# Altium footprint library PBL - THD Packages.PcbLib: 160 footprints (part 1 of 10)
Each footprint in its own frame and in the unit in brackets; x right, y up, seen from the top. Pads: shape width x height; smd on the part's side, far side on the other; paste and mask are expansions set on the pad; w line width, h text height; cw(c..) or ccw(c..) is an arc to the next point about the centre after c.
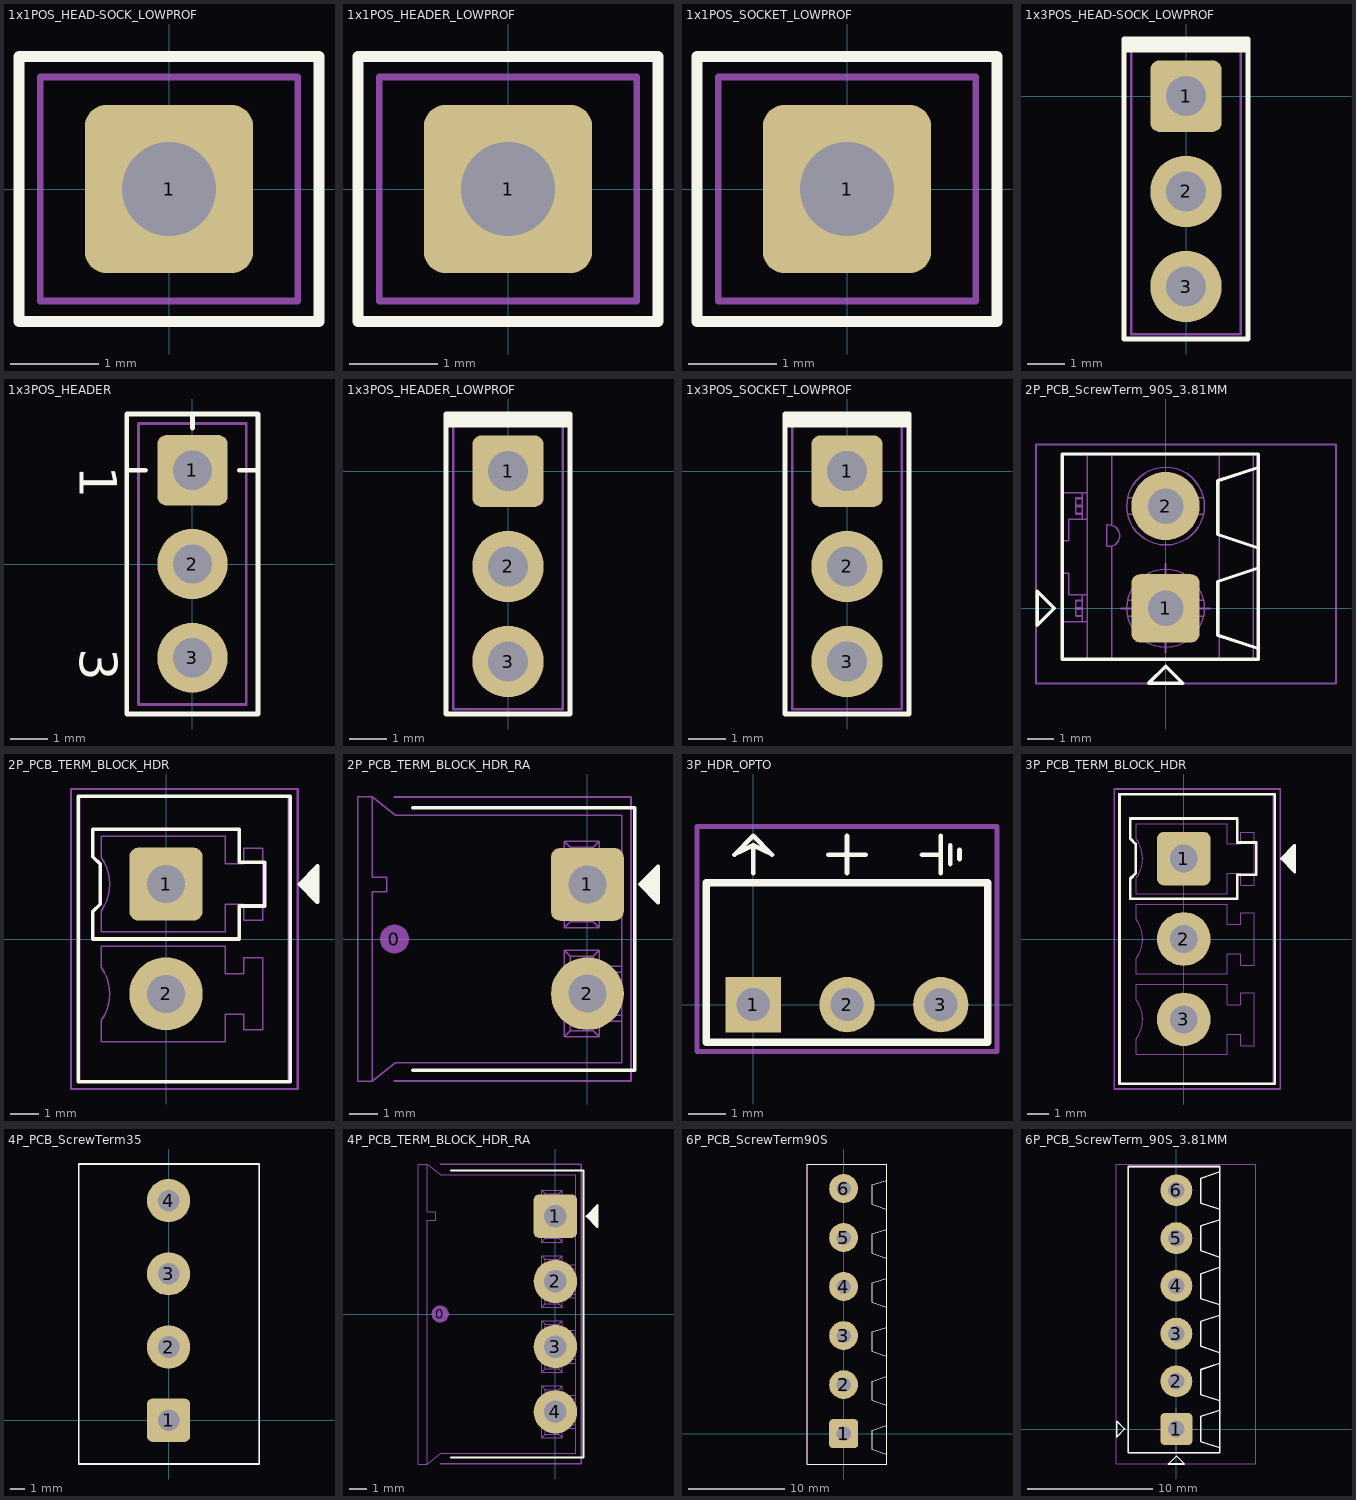
[diagram p0: the footprints below, top view; thin cyan lines are the x and y axes]

## 1x1POS_HEAD-SOCK_LOWPROF [mil] "Connector Socket with header, Single-row 1-position, 0.100\" pitch"
height 290
pads (1):
  rrect25% 75x75 hole 42: 1(0,0)
Top Overlay:
  lines w5: -66.93,-59.05 66.93,-59.05 66.93,59.06 -66.93,59.06 -66.93,-59.05
13 - 3D Top Side:
  lines w3: -57.47,-49.99 57.49,-49.99 57.49,50.01 -57.47,50.01 -57.47,-49.99
3D body: height 165, standoff -125, extent -57.47,-50 57.49,50
3D body: height 408, standoff 23, extent -57.47,-50 57.49,50

## 1x1POS_HEADER_LOWPROF [mil] "Connector Header, Single-row 1-position, 0.100\" pitch"
height 267
pads (1):
  rrect25% 75x75 hole 42: 1(0,0)
Top Overlay:
  lines w5: -66.93,-59.06 -66.93,59.06 66.93,59.06 66.93,-59.06 -66.93,-59.06
13 - 3D Top Side:
  lines w3: -57.47,-50 -57.47,50 57.49,50 57.49,-50 -57.47,-50
3D body: height 267, standoff -118, extent -57.47,-50 57.49,50

## 1x1POS_SOCKET_LOWPROF [mil] "Connector Socket, Single-row 1-position, 0.100\" pitch"
height 165
pads (1):
  rrect25% 75x75 hole 42: 1(0,0)
Top Overlay:
  lines w5: -66.93,-59.06 -66.93,59.06 66.93,59.06 66.93,-59.06 -66.93,-59.06
13 - 3D Top Side:
  lines w3: -57.47,-50 -57.47,50 57.49,50 57.49,-50 -57.47,-50
3D body: height 165, standoff -125, extent -57.47,-50 57.49,50

## 1x3POS_HEAD-SOCK_LOWPROF [mil] "Connector Socket with header, Single-row 3-position, 0.100\" pitch"
height 290
pads (3):
  rrect25% 75x75 hole 42: 1(0,0)
  round 75 hole 42: 2(0,-100) 3(0,-200)
Top Overlay:
  lines w5: -65,48.19 65,48.19 ; -65,52.13 65,52.13 ; -65,56.06 65,56.06 ; -65,-255 -65,60 65,60 65,-255 -65,-255
13 - 3D Top Side:
  lines w3: -57.47,-250 -57.47,50 57.49,50 57.49,-250 -57.47,-250
3D body: height 165, standoff -125, extent -57.47,-50 57.49,50
3D body: height 165, standoff -125, extent -57.47,-150 57.49,-50
3D body: height 165, standoff -125, extent -57.47,-250 57.49,-150
3D body: height 408, standoff 23, extent -57.48,-50 57.49,50
3D body: height 408, standoff 23, extent -57.48,-150 57.49,-50
3D body: height 408, standoff 23, extent -57.48,-250 57.49,-150

## 1x3POS_HEADER [mil] "Connector Header, Single-row 3-position, 0.100\" pitch"
height 235
pads (3):
  rrect25% 75x75 hole 42: 1(0,100)
  round 75 hole 42: 2(0,0) 3(0,-100)
Top Overlay:
  lines w5: -70,100 -50,100 ; 0,145 0,160 ; 50,100 70,100 ; -70,-160 70,-160 70,160 -70,160 -70,-160
  text "1" at -120,105 h40
  text "3" at -120,-90 h40
13 - 3D Top Side:
  lines w3: -57.47,-150 57.49,-150 57.49,150 -57.47,150 -57.47,-150
3D body: height 335.04, standoff -144.88, extent -57.47,-150 57.49,150

## 1x3POS_HEADER_LOWPROF [mil] "Connector Header, Single-row 3-position, 0.100\" pitch"
height 267
pads (3):
  rrect25% 75x75 hole 42: 1(0,0)
  round 75 hole 42: 2(0,-100) 3(0,-200)
Top Overlay:
  lines w5: -65,48.19 65,48.19 ; -65,52.13 65,52.13 ; -65,56.06 65,56.06 ; -65,-255 -65,60 65,60 65,-255 -65,-255
13 - 3D Top Side:
  lines w3: -57.47,-250 -57.47,50 57.49,50 57.49,-250 -57.47,-250
3D body: height 267, standoff -118, extent -57.47,-50 57.49,50
3D body: height 267, standoff -118, extent -57.47,-150 57.49,-50
3D body: height 267, standoff -118, extent -57.47,-250 57.49,-150

## 1x3POS_SOCKET_LOWPROF [mil] "Connector Socket, Single-row 3-position, 0.100\" pitch"
height 165
pads (3):
  rrect25% 75x75 hole 42: 1(0,0)
  round 75 hole 42: 2(0,-100) 3(0,-200)
Top Overlay:
  lines w5: -65,48.19 65,48.19 ; -65,52.13 65,52.13 ; -65,56.06 65,56.06 ; -65,-255 -65,60 65,60 65,-255 -65,-255
13 - 3D Top Side:
  lines w3: -57.47,-250 -57.47,50 57.49,50 57.49,-250 -57.47,-250
3D body: height 165, standoff -125, extent -57.47,-50 57.49,50
3D body: height 165, standoff -125, extent -57.47,-150 57.49,-50
3D body: height 165, standoff -125, extent -57.47,-250 57.49,-150

## 2P_PCB_ScrewTerm_90S_3.81MM [mil] "TERM BLOCK 2POS SIDE ENT STACKABLE 3.81MM"
height 334.65
pads (2):
  rrect25% 100x100 hole 52: 1(0,0)
  round 100 hole 52: 2(0,150)
Top Overlay:
  lines w5: 135.83,-59.06 76.78,-39.37 76.78,39.37 135.83,59.06 ; 135.83,88.58 76.78,108.27 76.78,187.01 135.83,206.69 ; -188,-25 -163,0 -188,25 -188,-25 ; -151.57,-75 -151.57,226.38 135.83,226.38 135.83,-75 -151.57,-75 ; -25,-110 25,-110 0,-85 -25,-110
13 - 3D Top Side:
  circle w1.97: c0,0 r57.09
  circle w1.97: c0,150 r57.09
  lines w1.97: -151.57,-19.69 -114.76,-19.69 -114.76,19.68 -141.73,19.68 -141.73,51.18 -151.57,51.18 ; -151.57,98.82 -141.73,98.82 -141.73,130.31 -114.76,130.31 -114.76,169.69 -151.57,169.69 ; -131.89,-10.91 -122.05,-10.91 ; -131.89,-1.06 -122.05,-1.06 ; -131.89,1.06 -122.05,1.06 ; -131.89,10.91 -122.05,10.91 ; -131.89,139.09 -122.05,139.09 ; -131.89,148.94 -122.05,148.94 ; -131.89,151.06 -122.05,151.06 ; -131.89,160.91 -122.05,160.91 ; -122.05,-19.69 -122.05,19.68 ; -122.05,-11.81 -131.89,-11.81 -131.89,11.81 -122.05,11.81 ; -122.05,130.31 -122.05,169.69 ; -122.05,138.19 -131.89,138.19 -131.89,161.81 -122.05,161.81 ; -114.56,-75 -114.56,225 ; -78.74,-75 -78.74,91.34 ; -78.74,121.65 -78.74,225 ; -55.85,-11.81 55.85,-11.81 ; -55.85,11.81 55.85,11.81 ; -55.85,138.19 55.85,138.19 ; -55.85,161.81 55.85,161.81 ; 78.74,-75 78.74,225 ; 128.89,-75 128.89,225 ; -151.57,-75 -151.57,225 135.83,225 135.83,-75 -151.57,-75 ; -85.91,90.75 -83.03,90.75 ccw(c-83.03,106.5) -83.03,122.24 -85.91,122.24 -85.91,90.75
15 - Top Courtyards:
  lines w3: -65,0 65,0 ; 0,-65 0,65 ; -190,-110 -190,240 250,240 250,-110 -190,-110
3D body: height 334.65, standoff -137.8, extent -151.57,-75.19 135.83,224.81

## 2P_PCB_TERM_BLOCK_HDR [mil] "TERM BLOCK HDR 2POS 3.81MM"
height 362.2
pads (2):
  rrect25% 100x100 hole 52: 1(0,75)
  round 100 hole 52: 2(0,-75)
Top Overlay:
  region: 182,75 207,100 207,50
  lines w5: -120,-195.08 -120,195.08 ; -120,-195 170,-195 ; -120,195 170,195 ; 170,-195.08 170,195.08 ; -100,0 -100,37.5 -90,47.5 -90,102.5 -100,112.5 -100,150 100,150 100,105 135,105 135,45 100,45 100,0 -100,0 ; 182,75 207,50 207,100 182,75
13 - 3D Top Side:
  circle w1.97: c0,-75 r35.43
  circle w1.97: c0,75 r35.43
  circle w1.97: c0,75 r43.31
  circle w1.97: c0,-75 r43.31
  lines w1.97: -118.11,-195.08 167.32,-195.08 167.32,195.08 -118.11,195.08 -118.11,-195.08 ; -88.58,-140.16 80.71,-140.16 80.71,-102.56 106.3,-102.56 106.3,-124.21 131.89,-124.21 131.89,-25.79 106.3,-25.79 106.3,-47.44 80.71,-47.44 80.71,-9.84 -88.58,-9.84 -88.58,-38.92 cw(c-137.8,-75) -88.58,-111.08 -88.58,-140.16 ; -88.58,9.84 80.71,9.84 80.71,47.44 106.3,47.44 106.3,25.79 131.89,25.79 131.89,124.21 106.3,124.21 106.3,102.56 80.71,102.56 80.71,140.16 -88.58,140.16 -88.58,111.08 cw(c-137.8,75) -88.58,38.92 -88.58,9.84 ; -15.75,-90.75 -15.75,-59.25 15.75,-59.25 15.75,-90.75 -15.75,-90.75 ; -15.75,59.25 -15.75,90.75 15.75,90.75 15.75,59.25 -15.75,59.25
15 - Top Courtyards:
  lines w3: -130,-205 -130,205 180,205 180,-205 -130,-205
3D body: height 362.2, standoff -133.86, extent -118.1,-195.07 167.33,195.08

## 2P_PCB_TERM_BLOCK_HDR_RA [mil] "TERM BLOCK HDR 2POS 3.81MM RIGHT-ANGLE"
height 362.2
pads (3):
  round 40 on Mech15: 0(-265,0)
  rrect25% 100x100 hole 52: 1(0,75)
  round 100 hole 52: 2(0,-75)
Top Overlay:
  region: 72,75 97,100 97,50
  lines w5: -240,-180 65,-180 65,180 -240,180 ; 72,75 97,50 97,100 72,75
13 - 3D Top Side:
  lines w1.97: 47.24,-112.8 7.87,-112.8 ; 47.24,-104.53 16.14,-104.53 ; 47.24,-45.47 16.14,-45.47 ; 47.24,-37.2 7.87,-37.2 ; 47.24,37.2 7.87,37.2 ; 47.24,45.47 16.14,45.47 ; 47.24,104.53 16.14,104.53 ; 47.24,112.8 7.87,112.8 ; -295.28,-195.08 -295.28,65.16 -275.59,65.16 -275.59,84.84 -295.28,84.84 -295.28,195.08 ; -295.28,-195.08 -314.96,-195.08 -314.96,195.08 -295.28,195.08 ; -295.28,-195.08 -263.78,-169.88 47.24,-169.88 47.24,169.88 -263.78,169.88 -295.28,195.08 ; -31.89,-134.45 -31.89,-15.55 ; -31.89,-134.45 16.14,-134.45 ; -31.89,-134.45 -23.62,-126.18 ; -31.89,-15.55 16.14,-15.55 ; -31.89,-15.55 -23.62,-23.82 ; -31.89,15.55 -31.89,134.45 ; -31.89,15.55 16.14,15.55 ; -31.89,15.55 -23.62,23.82 ; -31.89,134.45 16.14,134.45 ; -31.89,134.45 -23.62,126.18 ; -23.62,-126.18 -23.62,-23.82 ; -23.62,-126.18 7.87,-126.18 ; -23.62,-23.82 7.87,-23.82 ; -23.62,23.82 -23.62,126.18 ; -23.62,23.82 7.87,23.82 ; -23.62,126.18 7.87,126.18 ; 7.87,-126.18 16.14,-134.45 ; 7.87,-126.18 7.87,-112.8 ; 7.87,-112.8 cw(c16.14,-112.8) 16.14,-104.53 ; 7.87,-37.2 ccw(c16.14,-37.2) 16.14,-45.47 ; 7.87,-37.2 7.87,-23.82 ; 7.87,-23.82 16.14,-15.55 ; 7.87,23.82 16.14,15.55 ; 7.87,23.82 7.87,37.2 ; 7.87,37.2 cw(c16.14,37.2) 16.14,45.47 ; 7.87,112.8 ccw(c16.14,112.8) 16.14,104.53 ; 7.87,112.8 7.87,126.18 ; 7.87,126.18 16.14,134.45 ; 16.14,-134.45 16.14,-104.53 ; 16.14,-45.47 16.14,-15.55 ; 16.14,15.55 16.14,45.47 ; 16.14,104.53 16.14,134.45
15 - Top Courtyards:
  lines w3: -265,-195 60,-195 60,195 -265,195
3D body: height 291.34, standoff -129.92, extent -314.95,-195.07 47.25,195.08

## 3P_HDR_OPTO [mm] "Connector; screwterm; 3 Position"
height 10
pads (3):
  rect 1.5x1.5 hole 0.9: 1(0,0)
  round 1.5 hole 0.9: 2(2.54,0) 3(5.08,0)
Top Overlay:
  lines w0.127: 0,3.556 0,4.318 ; 2.032,4.064 3.048,4.064 ; 2.54,3.556 2.54,4.572 ; 4.572,4.064 5.08,4.064 5.08,4.572 5.08,3.556 ; 5.334,3.81 5.334,4.318 ; 5.588,3.937 5.588,4.191 ; 0,4.318 0.508,4.064 0,4.572 -0.508,4.064 0,4.318
  lines w0.2: -1.27,-1.016 6.35,-1.016 6.35,3.302 -1.27,3.302 -1.27,-1.016
15 - Top Courtyards:
  lines w0.127: -1.524,-1.27 6.604,-1.27 6.604,4.826 -1.524,4.826 -1.524,-1.27
3D body: height 6.48, standoff -3.56, extent -1.27,-0.317 6.35,10.732

## 3P_PCB_TERM_BLOCK_HDR [mil] "TERM BLOCK HDR 3POS 3.81MM"
height 362.2
pads (3):
  rrect25% 100x100 hole 52: 1(0,150)
  round 100 hole 52: 2(0,0) 3(0,-150)
Top Overlay:
  region: 182,150 207,175 207,125
  lines w5: -120,-270 170,-270 170,270 -120,270 -120,-270 ; -100,75 100,75 100,120 135,120 135,180 100,180 100,225 -100,225 -100,187.5 -90,177.5 -90,122.5 -100,112.5 -100,75 ; 182,150 207,175 207,125 182,150
13 - 3D Top Side:
  circle w1.97: c0,150 r35.43
  circle w1.97: c0,-150 r35.43
  circle w1.97: c0,0 r35.43
  circle w1.97: c0,150 r43.31
  circle w1.97: c0,0 r43.31
  circle w1.97: c0,-150 r43.31
  lines w1.97: -118.11,-270.08 -118.11,270.08 167.32,270.08 167.32,-270.08 -118.11,-270.08 ; -88.58,-215.16 -88.58,-186.08 ccw(c-137.8,-150) -88.58,-113.92 -88.58,-84.84 80.71,-84.84 80.71,-122.44 106.3,-122.44 106.3,-100.79 131.89,-100.79 131.89,-199.21 106.3,-199.21 106.3,-177.56 80.71,-177.56 80.71,-215.16 -88.58,-215.16 ; -88.58,-65.16 80.71,-65.16 80.71,-27.56 106.3,-27.56 106.3,-49.21 131.89,-49.21 131.89,49.21 106.3,49.21 106.3,27.56 80.71,27.56 80.71,65.16 -88.58,65.16 -88.58,36.08 cw(c-137.8,0) -88.58,-36.08 -88.58,-65.16 ; -88.58,84.84 -88.58,113.92 ccw(c-137.8,150) -88.58,186.08 -88.58,215.16 80.71,215.16 80.71,177.56 106.3,177.56 106.3,199.21 131.89,199.21 131.89,100.79 106.3,100.79 106.3,122.44 80.71,122.44 80.71,84.84 -88.58,84.84 ; -15.75,-165.75 15.75,-165.75 15.75,-134.25 -15.75,-134.25 -15.75,-165.75 ; -15.75,-15.75 15.75,-15.75 15.75,15.75 -15.75,15.75 -15.75,-15.75 ; -15.75,134.25 -15.75,165.75 15.75,165.75 15.75,134.25 -15.75,134.25
15 - Top Courtyards:
  lines w3: -130,-280 180,-280 180,280 -130,280 -130,-280
3D body: height 362.2, standoff -133.86, extent -118.1,-270.08 167.33,270.08

## 4P_PCB_ScrewTerm35 [mm] "TERM BLOCK 4POS 35° ENT 5.08MM"
height 15
pads (4):
  rrect25% 3x3 hole 1.5: 1(0,0)
  round 3 hole 1.5: 2(0,5.08) 3(0,10.16) 4(0,15.24)
Top Overlay:
  lines w0.127: -6.231,-3.04 6.289,-3.04 6.289,17.78 -6.231,17.78 -6.231,-3.04
13 - 3D Top Side:
  lines w0.076: -6.231,-3.04 -6.231,17.78 6.289,17.78 6.289,-3.04 -6.231,-3.04
3D body: height 15.04, standoff -3.76, extent -6.231,-3.04 6.289,17.78

## 4P_PCB_TERM_BLOCK_HDR_RA [mil] "TERM BLOCK HDR 4POS 3.81MM RIGHT-ANGLE"
height 362.2
pads (5):
  round 40 on Mech15: 0(-265,0)
  rrect25% 100x100 hole 52: 1(0,225)
  round 100 hole 52: 2(0,75) 3(0,-75) 4(0,-225)
Top Overlay:
  region: 72,225 97,250 97,200
  lines w5: -240,-330 65,-330 65,330 -240,330 ; 72,225 97,250 97,200 72,225
13 - 3D Top Side:
  lines w1.97: 47.24,-262.8 7.87,-262.8 ; 47.24,-254.53 16.14,-254.53 ; 47.24,-195.47 16.14,-195.47 ; 47.24,-187.2 7.87,-187.2 ; 47.24,-112.8 7.87,-112.8 ; 47.24,-104.53 16.14,-104.53 ; 47.24,-45.47 16.14,-45.47 ; 47.24,-37.2 7.87,-37.2 ; 47.24,37.2 7.87,37.2 ; 47.24,45.47 16.14,45.47 ; 47.24,104.53 16.14,104.53 ; 47.24,112.8 7.87,112.8 ; 47.24,187.2 7.87,187.2 ; 47.24,195.47 16.14,195.47 ; 47.24,254.53 16.14,254.53 ; 47.24,262.8 7.87,262.8 ; -295.28,-345.08 -314.96,-345.08 -314.96,345.08 -295.28,345.08 ; -295.28,-345.08 -295.28,215.16 -275.59,215.16 -275.59,234.84 -295.28,234.84 -295.28,345.08 ; -295.28,-345.08 -263.78,-319.88 47.24,-319.88 47.24,319.88 -263.78,319.88 -295.28,345.08 ; -31.89,-284.45 16.14,-284.45 ; -31.89,-284.45 -23.62,-276.18 ; -31.89,-284.45 -31.89,-165.55 ; -31.89,-165.55 16.14,-165.55 ; -31.89,-165.55 -23.62,-173.82 ; -31.89,-134.45 -31.89,-15.55 ; -31.89,-134.45 16.14,-134.45 ; -31.89,-134.45 -23.62,-126.18 ; -31.89,-15.55 16.14,-15.55 ; -31.89,-15.55 -23.62,-23.82 ; -31.89,15.55 -31.89,134.45 ; -31.89,15.55 16.14,15.55 ; -31.89,15.55 -23.62,23.82 ; -31.89,134.45 16.14,134.45 ; -31.89,134.45 -23.62,126.18 ; -31.89,165.55 -31.89,284.45 ; -31.89,165.55 16.14,165.55 ; -31.89,165.55 -23.62,173.82 ; -31.89,284.45 16.14,284.45 ; -31.89,284.45 -23.62,276.18 ; -23.62,-276.18 7.87,-276.18 ; -23.62,-276.18 -23.62,-173.82 ; -23.62,-173.82 7.87,-173.82 ; -23.62,-126.18 -23.62,-23.82 ; -23.62,-126.18 7.87,-126.18 ; -23.62,-23.82 7.87,-23.82 ; -23.62,23.82 7.87,23.82 ; -23.62,23.82 -23.62,126.18 ; -23.62,126.18 7.87,126.18 ; -23.62,173.82 7.87,173.82 ; -23.62,173.82 -23.62,276.18 ; -23.62,276.18 7.87,276.18 ; 7.87,-276.18 16.14,-284.45 ; 7.87,-276.18 7.87,-262.8 ; 7.87,-262.8 cw(c16.14,-262.8) 16.14,-254.53 ; 7.87,-187.2 ccw(c16.14,-187.2) 16.14,-195.47 ; 7.87,-187.2 7.87,-173.82 ; 7.87,-173.82 16.14,-165.55 ; 7.87,-126.18 16.14,-134.45 ; 7.87,-126.18 7.87,-112.8 ; 7.87,-112.8 cw(c16.14,-112.8) 16.14,-104.53 ; 7.87,-37.2 ccw(c16.14,-37.2) 16.14,-45.47 ; 7.87,-37.2 7.87,-23.82 ; 7.87,-23.82 16.14,-15.55 ; 7.87,23.82 16.14,15.55 ; 7.87,23.82 7.87,37.2 ; 7.87,37.2 cw(c16.14,37.2) 16.14,45.47 ; 7.87,112.8 ccw(c16.14,112.8) 16.14,104.53 ; 7.87,112.8 7.87,126.18 ; 7.87,126.18 16.14,134.45 ; 7.87,173.82 16.14,165.55 ; 7.87,173.82 7.87,187.2 ; 7.87,187.2 cw(c16.14,187.2) 16.14,195.47 ; 7.87,262.8 ccw(c16.14,262.8) 16.14,254.53 ; 7.87,262.8 7.87,276.18 ; 7.87,276.18 16.14,284.45 ; 16.14,-284.45 16.14,-254.53 ; 16.14,-195.47 16.14,-165.55 ; 16.14,-134.45 16.14,-104.53 ; 16.14,-45.47 16.14,-15.55 ; 16.14,15.55 16.14,45.47 ; 16.14,104.53 16.14,134.45 ; 16.14,165.55 16.14,195.47 ; 16.14,254.53 16.14,284.45
15 - Top Courtyards:
  lines w3: -265,-345 60,-345 60,345 -265,345
3D body: height 291.34, standoff -129.92, extent -314.95,-345.07 47.25,345.08

## 6P_PCB_ScrewTerm90S [mm] "TERM BLOCK 6POS SIDE ENT STACKABLE 5.08MM"
height 10
pads (6):
  rrect25% 3x3 hole 1.5: 1(0,0)
  round 3 hole 1.5: 2(0,5.08) 3(0,10.16) 4(0,15.24) 5(0,20.32) 6(0,25.4)
Top Overlay:
  lines w0.127: 4.45,-2.124 2.95,-1.624 2.95,0.376 4.45,0.876 ; 4.45,2.956 2.95,3.456 2.95,5.456 4.45,5.956 ; 4.45,8.036 2.95,8.536 2.95,10.536 4.45,11.036 ; 4.45,13.116 2.95,13.616 2.95,15.616 4.45,16.116 ; 4.45,18.196 2.95,18.696 2.95,20.696 4.45,21.196 ; 4.45,23.276 2.95,23.776 2.95,25.776 4.45,26.276 ; -3.75,-3.14 -3.75,27.94 4.45,27.94 4.45,-3.14 -3.75,-3.14
13 - 3D Top Side:
  lines w0.076: -3.75,-3.14 -3.75,27.94 4.45,27.94 4.45,-3.14 -3.75,-3.14
3D body: height 10.02, standoff -2.58, extent -3.75,-3.14 4.45,27.94

## 6P_PCB_ScrewTerm_90S_3.81MM [mil] "TERM BLOCK 6POS SIDE ENT STACKABLE 3.81MM"
height 334.65
pads (6):
  rrect25% 100x100 hole 52: 1(0,0)
  round 100 hole 52: 2(0,150) 3(0,300) 4(0,450) 5(0,600) 6(0,750)
Top Overlay:
  lines w5: 135.83,-59.06 76.78,-39.37 76.78,39.37 135.83,59.06 ; 135.83,88.58 76.78,108.27 76.78,187.01 135.83,206.69 ; 135.83,240 76.78,259.69 76.78,338.43 135.83,358.11 ; 135.83,390 76.78,409.69 76.78,488.43 135.83,508.11 ; 135.83,540 76.78,559.68 76.78,638.43 135.83,658.11 ; 135.83,690 76.78,709.68 76.78,788.43 135.83,808.11 ; -188,-25 -163,0 -188,25 -188,-25 ; -151.57,-75 -151.57,825 135.83,825 135.83,-75 -151.57,-75 ; -25,-110 25,-110 0,-85 -25,-110
13 - 3D Top Side:
  lines w3: -151.57,-75 135.83,-75 135.83,825 -151.57,825 -151.57,-75
15 - Top Courtyards:
  lines w3: -65,0 65,0 ; 0,-65 0,65 ; -190,-110 -190,832.88 250,832.88 250,-110 -190,-110
3D body: height 335.25, standoff -137.2, extent -151.57,-75 135.83,825